# Altium footprint library Propia.PcbLib: 378 footprints (part 19 of 24)
Each footprint in its own frame and in the unit in brackets; x right, y up, seen from the top. Pads: shape width x height; smd on the part's side, far side on the other; paste and mask are expansions set on the pad; w line width, h text height; cw(c..) or ccw(c..) is an arc to the next point about the centre after c.
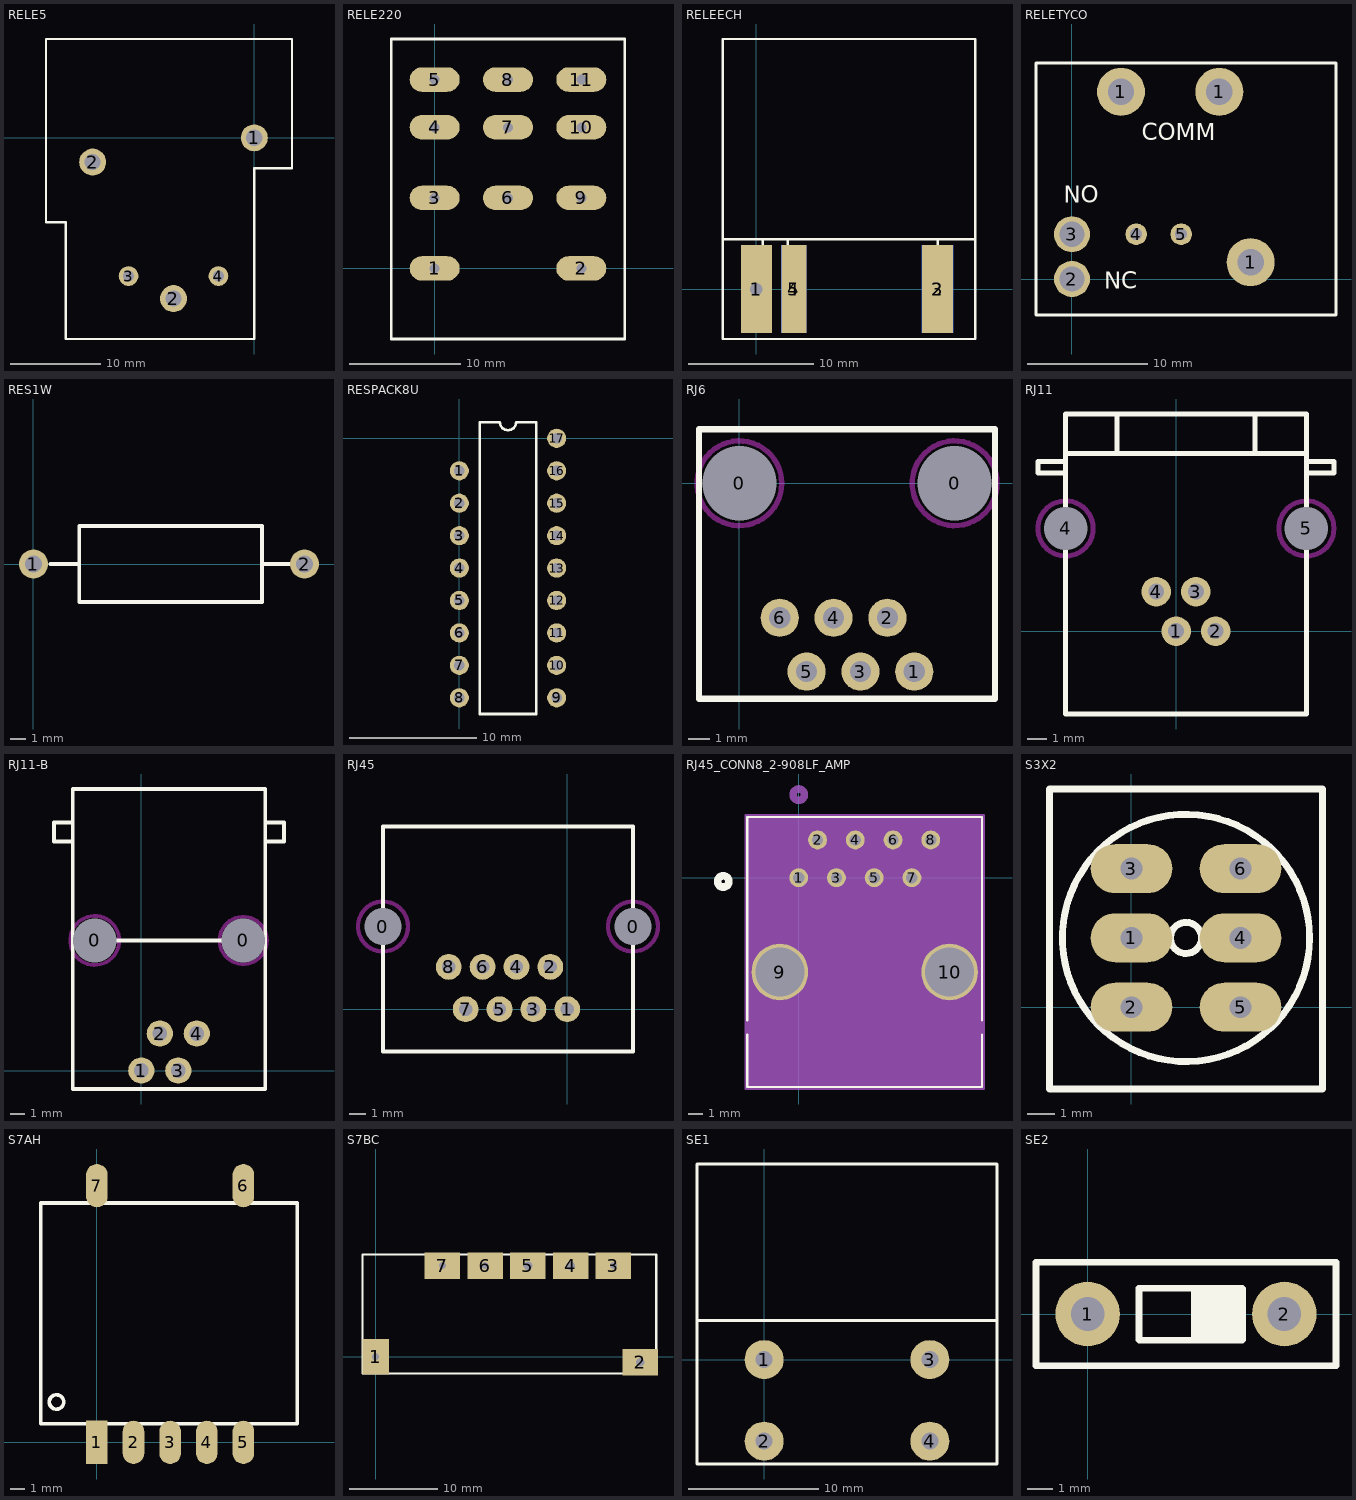
[diagram p18: the footprints below, top view; thin cyan lines are the x and y axes]

## RELE5 [mm]
pads (5):
  round 3 hole 1.8: 1(0,0) 2(-18,-2.7) 2(-9,-17.9)
  round 2.2 hole 1.2: 3(-14,-15.4) 4(-4,-15.4)
TopOverlay:
  lines w0.254: -23.2,-9.4 -21,-9.4 -21,-22.4 0,-22.4 0,-3.4 4.2,-3.4 4.2,11 -23.2,11 -23.2,-9.4

## RELE220 [mm]
pads (11):
  oval 4.5x2.2 hole 0.9: 1(0,0) 2(13.2,0) 3(0,6.35) 4(0,12.7) 5(0,17) 6(6.6,6.35) 7(6.6,12.7) 8(6.6,17) 9(13.2,6.35) 10(13.2,12.7) 11(13.2,17)
TopOverlay:
  lines w0.254: -3.9,-6.35 -3.9,20.65 17.1,20.65 17.1,-6.35 -3.9,-6.35
Mechanical1:
  lines w0.254: -1,0 1,0 ; -1,6.35 1,6.35 ; -1,12.7 1,12.7 ; -1,17 1,17 ; 5.6,6.35 7.6,6.35 ; 5.6,12.7 7.6,12.7 ; 5.6,17 7.6,17 ; 12.2,0 14.2,0 ; 12.2,6.35 14.2,6.35 ; 12.2,12.7 14.2,12.7 ; 12.2,17 14.2,17

## RELEECH [mm]
pads (5):
  rect 2.5x7 hole 1: 1(0,0)
  rect 2.5x7 smd far side: 2(14.5,0)
  rect 2.5x7 smd: 3(14.5,0)
  rect 2x7 smd far side: 4(3,0)
  rect 2x7 smd: 5(3,0)
TopOverlay:
  lines w0.2: 0.5,0 0.5,4 ; 2.5,0 2.5,4 ; 14.5,0 14.5,4 ; -2.7,4 17.5,4 ; -2.7,4 -2.7,-4 17.5,-4 17.5,4 ; -2.7,4 -2.7,20 17.5,20 17.5,4

## RELETYCO [mm]
pads (7):
  round 4 hole 2.2: 1(4.08,15.6) 1(12.28,15.6) 1(14.88,1.4)
  round 3 hole 2.1: 2(0,0) 3(0,3.73)
  round 1.8 hole 1: 4(5.35,3.73) 5(9.1,3.73)
TopOverlay:
  lines w0.254: -3,-3 -3,18 22,18 22,-3 -3,-3
  text "NO" at -0.67,6.37 h1.4
  text "NC" at 2.7,-0.8 h1.4
  text "COMM" at 5.81,11.55 h1.4

## RES1W [mm]
pads (2):
  round 1.9 hole 1.1: 1(0,0) 2(17.78,0)
TopOverlay:
  lines w0.254: 1.1,0 3,0 ; 15,0 16.8,0 ; 3,0 3,-2.5 15,-2.5 15,2.5 3,2.5 3,0

## RESPACK8U [mm]
pads (17):
  round 1.5 hole 0.8: 1(0,-2.54) 2(0,-5.08) 3(0,-7.62) 4(0,-10.16) 5(0,-12.7) 6(0,-15.24) 7(0,-17.78) 8(0,-20.32) 9(7.62,-20.32) 10(7.62,-17.78) 11(7.62,-15.24) 12(7.62,-12.7) 13(7.62,-10.16) 14(7.62,-7.62) 15(7.62,-5.08) 16(7.62,-2.54) 17(7.62,0)
TopOverlay:
  lines w0.2: 1.585,-21.59 6.035,-21.59 6.035,1.27 4.445,1.27 cw(c3.81,1.27) 3.175,1.27 1.585,1.27 1.585,-21.59

## RJ6 [mm]
pads (8):
  round 3 hole 3.5: 0(0,0) 0(10.16,0)
  round 1.8 hole 1: 1(8.255,-8.89) 2(6.985,-6.35) 3(5.715,-8.89) 4(4.445,-6.35) 5(3.175,-8.89) 6(1.905,-6.35)
TopOverlay:
  lines w0.305: -1.905,-10.16 12.065,-10.16 12.065,2.54 -1.905,2.54 -1.905,-10.16
KeepOutLayer:
  circle w0.254: c0,0 r2
  circle w0.254: c10.16,0 r2

## RJ11 [mm]
pads (6):
  round 1.5 hole 0.8: 1(0,0) 2(2,0) 3(1,2) 4(-1.01,2)
  round 1.8 hole 2.2: 4(-5.6,5.2) 5(6.6,5.2)
TopOverlay:
  lines w0.254: -5.6,8 -7,8 -7,8.6 -5.6,8.6 ; -5.6,9 6.59,9 ; -2.99,9.06 -2.99,11 ; 4,9.03 4,11 ; 6.6,8 8,8 8,8.6 6.6,8.6 ; -5.6,-4.2 6.6,-4.2 6.6,11 -5.6,11 -5.6,-4.2
KeepOutLayer:
  circle w0.254: c6.6,5.2 r1.4
  circle w0.254: c-5.6,5.2 r1.4

## RJ11-B [mm]
pads (6):
  round 2.5 hole 3: 0(-3.2,8.93) 0(7,8.93)
  round 1.8 hole 1: 1(0,0) 2(1.27,2.54) 3(2.54,0) 4(3.81,2.54)
TopOverlay:
  lines w0.254: -4.7,8.93 8.5,8.93 ; -4.7,15.73 -6,15.73 -6,17.03 -4.7,17.03 ; 8.5,15.73 9.8,15.73 9.8,17.03 8.5,17.03 ; -4.7,-1.27 8.5,-1.27 8.5,19.33 -4.7,19.33 -4.7,-1.27
KeepOutLayer:
  circle w0.254: c7,8.93 r1.631
  circle w0.254: c-3.2,8.93 r1.687

## RJ45 [mm]
pads (10):
  round 1.524 hole 2.2: 0(-11.056,4.96) 0(3.944,4.96)
  round 1.55 hole 0.8: 1(0,0) 2(-1.016,2.54) 3(-2.032,0) 4(-3.048,2.54) 5(-4.064,0) 6(-5.08,2.54) 7(-6.096,0) 8(-7.112,2.54)
TopOverlay:
  lines w0.254: -11.056,-2.54 3.944,-2.54 3.944,10.96 -11.056,10.96 -11.056,-2.54
KeepOutLayer:
  circle w0.254: c-11.056,4.96 r1.5
  circle w0.254: c3.944,4.96 r1.5

## RJ45_CONN8_2-908LF_AMP [mil] "Conector hembra RJ45 Plastico"
pads (10):
  round 50 / inner round 60 / far side round 50 hole 30 paste-99999 mask+0: 1(0,0) 2(50,100) 3(100,0) 4(150,100) 5(200,0) 6(250,100) 7(300,0) 8(350,100)
  round 150 / inner round 60 / far side round 150 hole 130 paste-99999 mask-75: 9(-50,-250) 10(400,-250)
TopOverlay:
  circle w20: c-200,-10 r15
  lines w6: -136,-416.13 -136,-555.01 486,-555.01 486,-416.13 ; -136,-377.89 -136,160.99 486,160.99 486,-377.89
BottomOverlay:
  circle w20: c-220,-10 r15
Mechanical13:
  circle w20: c0,220 r15
  lines w1: -131,-550.01 481,-550.01 481,155.99 -131,155.99 -131,-550.01
Mechanical15:
  region: 491,165.99 -141,165.99 -141,-560.01 491,-560.01
  lines w6: -141,-560.01 -141,165.99 491,165.99 491,-560.01 -141,-560.01

## S3X2 [mm]
pads (6):
  oval 3x1.8 hole 0.8: 1(0,2.54) 2(0,0) 3(0,5.08) 4(4,2.54) 5(4,0) 6(4,5.08)
TopOverlay:
  circle w0.254: c2,2.54 r0.57
  circle w0.254: c2,2.54 r4.533
  lines w0.254: -3,-3 7,-3 7,8 -3,8 -3,-2.99
Mechanical1:
  lines w0.2: -0.51,5.08 0.49,5.08 ; -0.5,0 0.5,0 ; -0.5,2.54 0.5,2.54 ; 3.49,0 4.49,0 ; 3.49,2.54 4.49,2.54 ; 3.49,5.08 4.49,5.08

## S7AH [mm]
pads (7):
  rect 1.5x3 smd: 1(0,0)
  oval 1.5x3 smd: 2(2.54,0) 3(5.08,0) 4(7.62,0) 5(10.16,0) 6(10.16,17.8) 7(0,17.8)
TopOverlay:
  circle w0.254: c-2.8,2.8 r0.5
  lines w0.254: -3.9,1.3 13.9,1.3 13.9,16.6 -3.9,16.6 -3.9,1.3

## S7BC [mm]
pads (7):
  rect 3x4 hole 0.8: 1(0,0)
  rect 4x3 hole 1: 2(29.91,-0.63) 4(22.03,10.29) 5(17.2,10.29)
  rect 4x3 hole 0.8: 3(26.86,10.29) 6(12.37,10.29) 7(7.54,10.29)
TopOverlay:
  lines w0.254: -1.5,-1.9 31.7,-1.9 31.7,11.56 -1.5,11.56 -1.5,-1.9

## SE1 [mm]
pads (4):
  round 3 hole 1.3: 1(0,0) 2(0,-6.25) 3(12.7,0) 4(12.7,-6.25)
TopOverlay:
  lines w0.254: -5.14,3 17.8,3 17.82,2.98 ; -5.15,-8 -5.15,15 17.85,15 17.85,-8 -5.15,-8

## SE2 [mm]
pads (2):
  round 2.5 hole 1.3: 1(0,0) 2(7.62,0)
TopOverlay:
  rectangle: 4.01,-0.98 5.96,0.94
  lines w0.254: -2,-2 -2,0 -2,2 9.62,2 9.62,-2 -2,-2 ; 1.99,-1 1.99,0.99 5.99,0.99 6,0.98 6,-1 5.99,-1.01 2,-1.01 1.99,-1